# Altium footprint library 74LVC125AD118.PcbLib: 1 footprints
Each footprint in its own frame and in the unit in brackets; x right, y up, seen from the top. Pads: shape width x height; smd on the part's side, far side on the other; paste and mask are expansions set on the pad; w line width, h text height; cw(c..) or ccw(c..) is an arc to the next point about the centre after c.
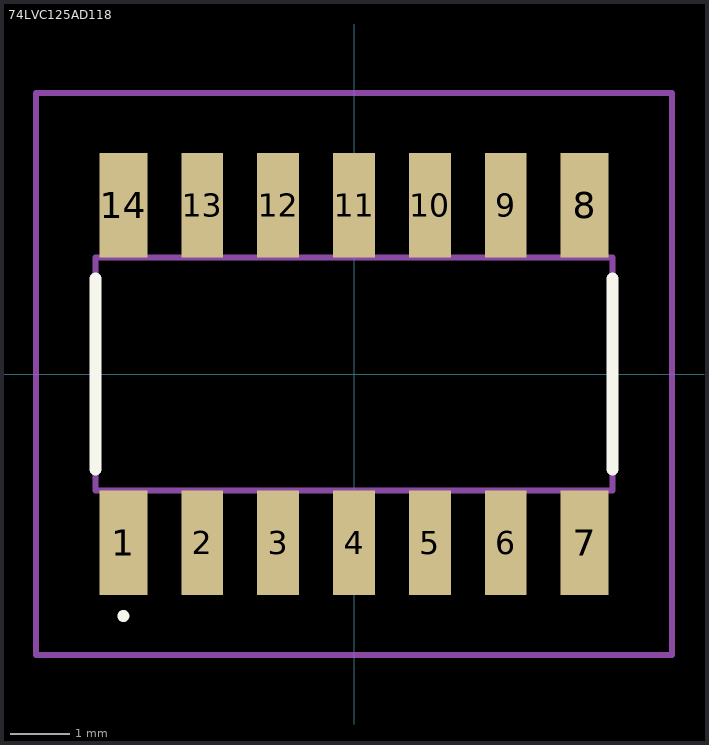
[diagram p0: the footprint, top view; thin cyan lines are the x and y axes]

## 74LVC125AD118 [mm]
pads (14):
  rect 0.8x1.75 smd: 1(-3.86,-2.825) 7(3.86,-2.825) 8(3.86,2.825) 14(-3.86,2.825)
  rect 0.7x1.75 smd: 2(-2.54,-2.825) 3(-1.27,-2.825) 4(0,-2.825) 5(1.27,-2.825) 6(2.54,-2.825) 9(2.54,2.825) 10(1.27,2.825) 11(0,2.825) 12(-1.27,2.825) 13(-2.54,2.825)
Top Overlay:
  lines w0.1: -3.86,-4.1 cw(c-3.86,-4.05) -3.86,-4 ; -3.86,-4.1 -3.86,-4.1 ; -3.86,-4.1 ccw(c-3.86,-4.05) -3.86,-4 ; -3.86,-4 -3.86,-4
  lines w0.2: -4.325,-1.6 -4.325,1.6 ; 4.325,-1.6 4.325,1.6
Mechanical 15:
  lines w0.1: -4.325,-1.95 4.325,-1.95 4.325,1.95 -4.325,1.95 -4.325,-1.95
Mechanical 20:
  lines w0.1: -5.325,-4.7 5.325,-4.7 5.325,4.7 -5.325,4.7 -5.325,-4.7